# Altium schematic symbol library for_Lamp.SchLib: 19 symbols
Pins are listed as number, name and electrical type; pins without a type are passive.

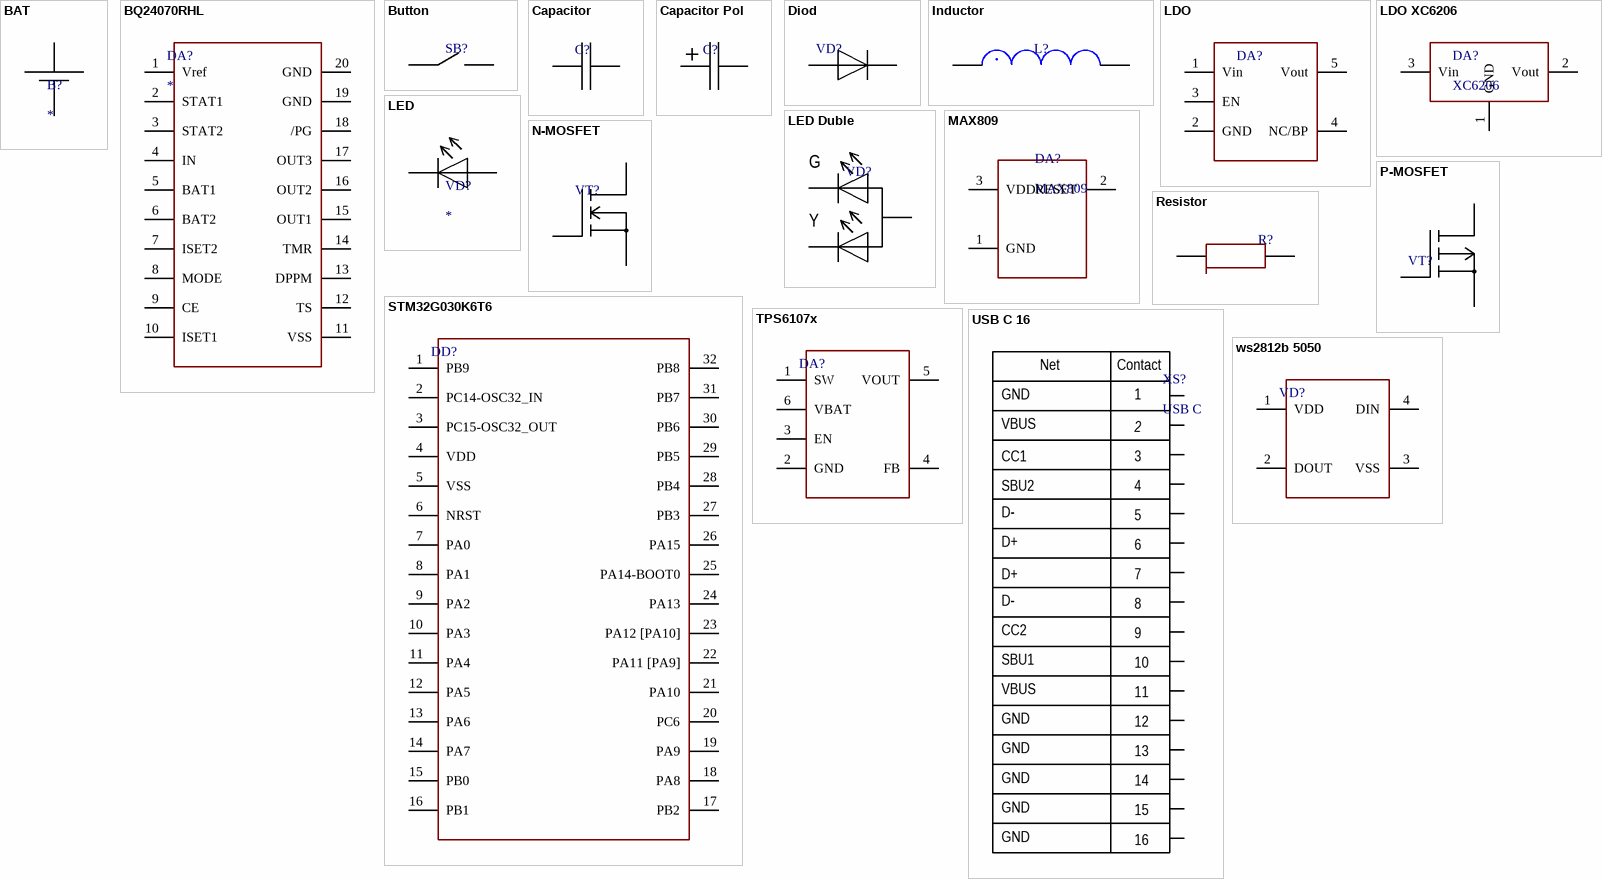
[diagram p0: symbols BAT to ws2812b 5050]

## BAT
designator B?
footprint bat_cont
pins: 1 P, 2 N

## BQ24070RHL
designator DA?
footprint VQFN20 (3.5*4.5) (For BQ24070)
pins: 1 Vref, 2 STAT1, 3 STAT2, 4 IN, 5 BAT1, 6 BAT2, 7 ISET2, 8 MODE, 9 CE, 10 ISET1, 11 VSS, 12 TS, 13 DPPM, 14 TMR, 15 OUT1, 16 OUT2, 17 OUT3, 18 /PG, 19 GND, 20 GND

## Button
designator SB?  (value not drawn)
footprint KLS7-TS3606
pins: 1, 2

## Capacitor
designator C?  (value not drawn)
footprint C0402 (Chip Capacitor, 2-Leads, Body 1,00x0,50mm, IPC Medium Density)
footprint C0805 (Chip Capacitor, 2-Leads, Body 2,00x1,25mm, IPC Medium Density)
footprint С0603 (Chip Capacitor, 2-Leads, Body 1,60x0,80mm, IPC Medium Density)
pins: 1, 2

## Capacitor Pol
designator C?  (value not drawn)
footprint C6.3x7.7 (Aluminum Electrolytic Capacitor, Body 6,60x6,60x7,70mm, IPC Low Density)
footprint C10x10.5 (Aluminum Electrolytic Capacitor, Body 10,30x10,30x11,00mm, IPC Low Density)
footprint CAP TA 3216 (Molded Capacitor, 2-Leads, Body 3,20x1,60mm, IPC Medium Density)
pins: 1, 2

## Diod
designator VD?  (value not drawn)
footprint SOD323
pins: 1 Anode, 2 Сathode

## Inductor
designator L?
footprint LQH32CN100K23
pins: 1, 2

## LDO
designator DA?  (value not drawn)
footprint SOT23-5
pins: 1 Vin, 2 GND, 3 EN, 4 NC/BP, 5 Vout

## LDO XC6206
designator DA?, comment XC6206
footprint SOT23-3
pins: 1 GND, 2 Vout, 3 Vin

## LED
designator VD?
footprint KPA-3010SGC (3.0 x 1.0 mm Right Angle SMD Chip LED Lamp)
pins: 1 Cathode, 2 Anode

## LED Duble
designator VD?  (value not drawn)
footprint APBA3010SYKCGKC-GX
pins: 1 Anode, 2 Yellow, 3 Green
text: G; Y

## MAX809
designator DA?
footprint SOT23-3
pins: 1 GND, 2 RESET, 3 VDD

## N-MOSFET
designator VT?  (value not drawn)
footprint SOT23-3
pins: 1 Gate, 2 Source, 3 Drain

## P-MOSFET
designator VT?  (value not drawn)
footprint SOT23-3
pins: 1 Gate, 2 Source, 3 Drain

## Resistor
designator R?
footprint 0402 (Chip Resistor, 2-Leads, Body 1,00x0,50mm, IPC Medium Density)
footprint 0603 (Chip Resistor, 2-Leads, Body 1,60x0,80mm, IPC Medium Density)
footprint 0805 (Chip Resistor, 2-Leads, Body 2,00x1,25mm, IPC Medium Density)
pins: 1, 2

## STM32G030K6T6
designator DD?  (value not drawn)
footprint LQFP32 (CQFP, 32-Leads, Body 9,00x9,00mm, Pitch 0,80mm, IPC Medium Density)
pins: 1 PB9, 2 PC14-OSC32_IN, 3 PC15-OSC32_OUT, 4 VDD, 5 VSS, 6 NRST, 7 PA0, 8 PA1, 9 PA2, 10 PA3, 11 PA4, 12 PA5, 13 PA6, 14 PA7, 15 PB0, 16 PB1, 17 PB2, 18 PA8, 19 PA9, 20 PC6, 21 PA10, 22 PA11 [PA9], 23 PA12 [PA10], 24 PA13, 25 PA14-BOOT0, 26 PA15, 27 PB3, 28 PB4, 29 PB5, 30 PB6, 31 PB7, 32 PB8

## TPS6107x
designator DA?  (value not drawn)
Efficient Synchronous Boost Converter
footprint SOT23-6
pins: 1 SW, 2 GND, 3 EN, 4 FB, 5 VOUT, 6 VBAT

## USB C 16
designator XS?, comment USB C
footprint USB C 16
pins: 1 GND, 2 VBUS, 3 CC1, 4 SBU2, 5 D-, 6 D+, 7 D+, 8 D-, 9 CC2, 10 SBU1, 11 VBUS, 12 GND, 13 GND, 14 GND, 15 GND, 16 GND
text: Net; Contaсt

## ws2812b 5050
designator VD?  (value not drawn)
footprint LED 5050 ws2812b
pins: 1 VDD, 2 DOUT, 3 VSS, 4 DIN